# Altium schematic symbol library Resistor.SchLib: 1085 symbols (part 6 of 29)
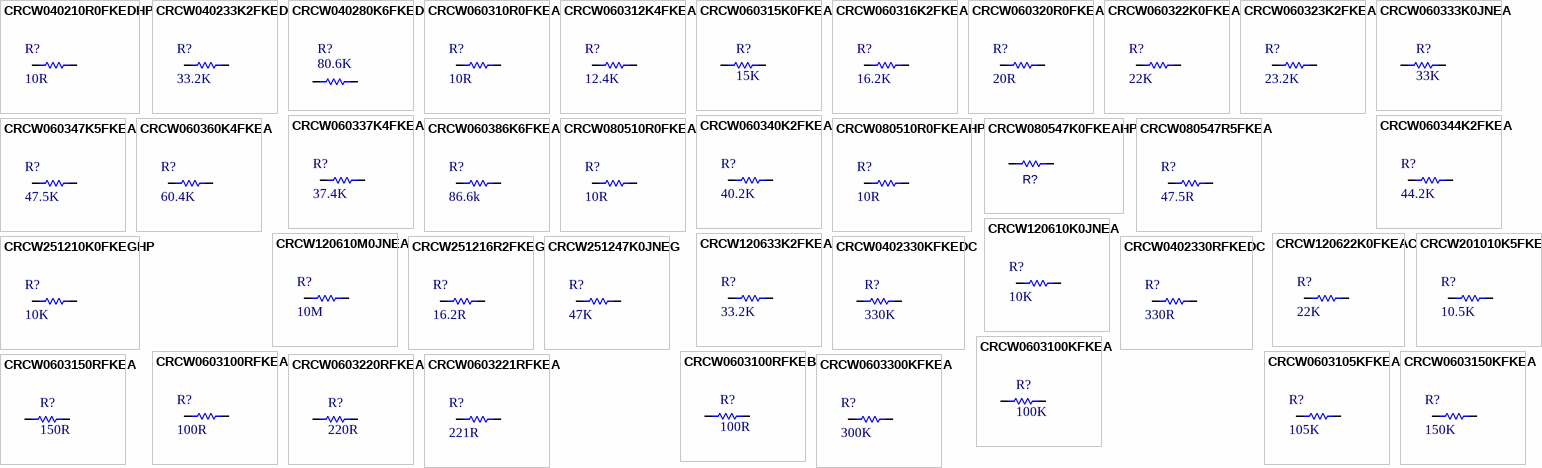
[diagram p32: symbols CRCW040210R0FKEDHP to CRCW0603300KFKEA]

## CRCW060322K0FKEA
designator R?, comment 22K
RES SMD 22K OHM 1% 1/10W 0603; Manufacturer: Vishay; Manufacturer Part Number: CRCW060322K0FKEA; Voltage Rating: 75V; Value: 22kR; Power Rating: 100mW; Temperature Coefficient: 100ppm/°C; Item Type: Resistor; Supplier: Mouser; Supplier Part Number: 71-CRCW0603-22K-E3; RoHS: Yes; Category: Chip SMD Resistors; Stock: 93410; Pricing: 1=0.1, 10=0.019, 50=0.019, 100=0.009, 1000=0.007, 10000=0.004 (USD); Case/Package: 0603; Weight: 7.1E-05oz; Case Code (Imperial): 0603; Case Code (Metric): 1608; Contact Plating: Tin; Min Operating Temperature: -55°C; Max Operating Temperature: 155°C; Resistor Type: Thick Film; Tolerance: 1%; Packaging: Tape and Reel; Package Quantity: 5000; Number of Terminations: 2; Termination: SMD/SMT; Max Power Dissipation: 100mW; Voltage Rating (DC): 75V; Features: Automotive AEC-Q200; Series: CRCW; Technology: THICK FILM; Construction: Rectangular; Resistance Tolerance: 1%; Length: 1.55mm; Width: 0.85mm; Height: 0.45mm; Depth: 0.85mm; Ratings: AEC-Q200; Radiation Hardening: No; Military Standard: Not; Lead Free: Lead Free; RoHS Compliant: Yes; Reach SVHC Compliant: Unknown; ComponentLink1URL: https://datasheet.ciiva.com/7673/1720486-7673144.pdf?src-supplier=Element14; ComponentLink1Description: https://datasheet.ciiva.com/7673/1720486-7673144.pdf?src-supplier=Element14; ComponentLink2URL: https://datasheet.ciiva.com/26314/fld-crcw-e3-data-en-26314666.pdf?src-supplier=Distrelec; ComponentLink2Description: https://datasheet.ciiva.com/26314/fld-crcw-e3-data-en-26314666.pdf?src-supplier=Distrelec; ComponentLink3URL: https://datasheet.ciiva.com/7672/1697337-7672871.pdf?src-supplier=Element14; ComponentLink3Description: https://datasheet.ciiva.com/7672/1697337-7672871.pdf?src-supplier=Element14; LCSC Part Number: C844758
footprint Res-0603
pins: 1, 2

## CRCW060323K2FKEA
designator R?, comment 23.2K
RES SMD 23.2K OHM 1% 1/10W 0603; Manufacturer: Vishay; Manufacturer Part Number: CRCW060323K2FKEA; Item Type: Resistors; Value: 23.2kR; Power Rating: 100mW; Temperature Coefficient: 100ppm/°C; Voltage Rating: 75V; Supplier: Mouser; LCSC Part Number: C844148; RoHS: Yes; Stock: 8418; Pricing: 1=0.1, 10=0.017, 50=0.017, 100=0.01, 1000=0.009, 10000=0.006 (USD); Case/Package: 0603; Pins: 2; Weight: 7.1E-05oz; Case Code (Metric): 1608; Case Code (Imperial): 0603; Contact Plating: Tin; Min Operating Temperature: -55°C; Max Operating Temperature: 155°C; Tolerance: 1%; Packaging: Tape and Reel; Package Quantity: 5000; Number of Terminations: 2; Termination: SMD/SMT; Max Power Dissipation: 100mW; Features: Automotive AEC-Q200; Series: CRCW; Resistor Type: Thick Film; Resistance Tolerance: 1%; Technology: THICK FILM; Construction: Rectangular; Length: 1.55mm; Width: 0.85mm; Height: 0.45mm; Depth: 0.85mm; Ratings: AEC-Q200; Radiation Hardening: No; Lead Free: 5697LeadFree; RoHS Compliant: Yes; Military Standard: Not; Reach SVHC Compliant: Unknown; ComponentLink1URL: https://datasheet.ciiva.com/11810/0900766b80d98afc-11810102.pdf?src-supplier=Rs; ComponentLink1Description: https://datasheet.ciiva.com/11810/0900766b80d98afc-11810102.pdf?src-supplier=Rs; ComponentLink2URL: https://datasheet.ciiva.com/7671/1533075-7671775.pdf?src-supplier=Element14; ComponentLink2Description: https://datasheet.ciiva.com/7671/1533075-7671775.pdf?src-supplier=Element14; ComponentLink3URL: https://datasheet.ciiva.com/7671/1697337-7671609.pdf?src-supplier=Element14; ComponentLink3Description: https://datasheet.ciiva.com/7671/1697337-7671609.pdf?src-supplier=Element14; ComponentLink4URL: https://datasheet.ciiva.com/2525/dcrcwe3-2525378.pdf?src-supplier=Digikey; ComponentLink4Description: https://datasheet.ciiva.com/2525/dcrcwe3-2525378.pdf?src-supplier=Digikey; ComponentLink5URL: https://datasheet.ciiva.com/2525/dcrcwe3-2525379.pdf?src-supplier=Digikey; ComponentLink5Description: https://datasheet.ciiva.com/2525/dcrcwe3-2525379.pdf?src-supplier=Digikey; ComponentLink6URL: https://datasheet.ciiva.com/22869/70201119-22869353.pdf?src-supplier=Allied+Electronics; ComponentLink6Description: https://datasheet.ciiva.com/22869/70201119-22869353.pdf?src-supplier=Allied+Electronics; ComponentLink7URL: https://datasheet.ciiva.com/5542/dcrcwe3-109170-5542813.pdf?src-supplier=Mouser; ComponentLink7Description: https://datasheet.ciiva.com/5542/dcrcwe3-109170-5542813.pdf?src-supplier=Mouser; ComponentLink8URL: https://datasheet.ciiva.com/2525/dcrcwe3-2525377.pdf?src-supplier=Digikey; ComponentLink8Description: https://datasheet.ciiva.com/2525/dcrcwe3-2525377.pdf?src-supplier=Digikey; ComponentLink9URL: https://datasheet.ciiva.com/16775/70201119-16775386.pdf?src-supplier=Allied+Electronics; ComponentLink9Description: https://datasheet.ciiva.com/16775/70201119-16775386.pdf?src-supplier=Allied+Electronics; ComponentLink10URL: https://datasheet.ciiva.com/3257/dcrcwe3-3257292.pdf?src-supplier=Avnet; ComponentLink10Description: https://datasheet.ciiva.com/3257/dcrcwe3-3257292.pdf?src-supplier=Avnet; ComponentLink11URL: https://datasheet.ciiva.com/16430/dcrcwe3-16430088.pdf?src-supplier=Future+Electronics; ComponentLink11Description: https://datasheet.ciiva.com/16430/dcrcwe3-16430088.pdf?src-supplier=Future+Electronics; ComponentLink12URL: https://datasheet.ciiva.com/3257/dcrcwe3-3257291.pdf?src-supplier=Avnet; ComponentLink12Description: https://datasheet.ciiva.com/3257/dcrcwe3-3257291.pdf?src-supplier=Avnet
footprint Res-0603
pins: 1, 2

## CRCW060333K0JNEA
designator R?, comment 33K
RES SMD 33K OHM 5% 1/10W 0603; Item Type: Resistor; Value: 33kR; Power Rating: 100mW; Voltage Rating: 75V; Temperature Coefficient: 200ppm/°C; LCSC Part Number: C4342762; ComponentLink1Description: LCSC; Supplier: Mouser; Supplier Part Number: 71-CRCW0603J-33K-E3; RoHS: Yes; Category: Chip SMD Resistors; Stock: 42690; Pricing: 1=0.1, 10=0.017, 50=0.017, 100=0.008, 1000=0.006, 10000=0.003 (USD); Case/Package: 0603; Pins: 2; Case Code (Metric): 1608; Case Code (Imperial): 0603; Weight: 7.1E-05oz; Contact Plating: Tin; Min Operating Temperature: -55°C; Max Operating Temperature: 155°C; Tolerance: 5%; Packaging: Tape and Reel; Package Quantity: 5000; Resistor Type: Thick Film; Number of Terminations: 2; Termination: SMD/SMT; Max Power Dissipation: 100mW; Voltage Rating (DC): 75V; Features: Automotive AEC-Q200; Series: CRCW; Resistance Tolerance: 5%; Construction: Rectangular; Technology: THICK FILM; Length: 1.55mm; Width: 0.85mm; Height: 0.45mm; Depth: 0.85mm; Ratings: AEC-Q200; Radiation Hardening: No; Lead Free: Lead Free; RoHS Compliant: Yes; Reach SVHC Compliant: Unknown; Military Standard: Not; ComponentLink2URL: https://datasheet.ciiva.com/2462/dcrcwe3-2462530.pdf?src-supplier=Digi-Key; ComponentLink2Description: https://datasheet.ciiva.com/2462/dcrcwe3-2462530.pdf?src-supplier=Digi-Key; ComponentLink3URL: https://datasheet.ciiva.com/2462/dcrcwe3-2462531.pdf?src-supplier=Digi-Key; ComponentLink3Description: https://datasheet.ciiva.com/2462/dcrcwe3-2462531.pdf?src-supplier=Digi-Key; ComponentLink4URL: https://datasheet.ciiva.com/2462/dcrcwe3-2462529.pdf?src-supplier=Digi-Key; ComponentLink4Description: https://datasheet.ciiva.com/2462/dcrcwe3-2462529.pdf?src-supplier=Digi-Key; ComponentLink5URL: https://datasheet.ciiva.com/16778/70201119-16778952.pdf?src-supplier=Allied+Electronics; ComponentLink5Description: https://datasheet.ciiva.com/16778/70201119-16778952.pdf?src-supplier=Allied+Electronics; ComponentLink6URL: https://datasheet.ciiva.com/5551/dcrcwe3-109170-5551035.pdf?src-supplier=Mouser; ComponentLink6Description: https://datasheet.ciiva.com/5551/dcrcwe3-109170-5551035.pdf?src-supplier=Mouser; ComponentLink7URL: https://datasheet.ciiva.com/3257/dcrcwe3-3257470.pdf?src-supplier=Avnet; ComponentLink7Description: https://datasheet.ciiva.com/3257/dcrcwe3-3257470.pdf?src-supplier=Avnet; ComponentLink8URL: https://datasheet.ciiva.com/16389/dcrcwe3-16389979.pdf?src-supplier=Future+Electronics; ComponentLink8Description: https://datasheet.ciiva.com/16389/dcrcwe3-16389979.pdf?src-supplier=Future+Electronics; ComponentLink9URL: https://datasheet.ciiva.com/3257/dcrcwe3-3257469.pdf?src-supplier=Avnet; ComponentLink9Description: https://datasheet.ciiva.com/3257/dcrcwe3-3257469.pdf?src-supplier=Avnet
footprint Res-0603
pins: 1, 2

## CRCW060337K4FKEA
designator R?, comment 37.4K
RES SMD 37.4K OHM 1% 1/10W 0603; Manufacturer: Vishay; Manufacturer Part Number: CRCW060337K4FKEA; Item Type: Resistor; Supplier: Digikey; LCSC Part Number: C844359; RoHS: Yes; Stock: 9664; Pricing: 1=0.1, 10=0.026, 50=0.0166, 100=0.014, 500=0.00954, 1000=0.00824 (USD); ComponentLink1URL: https://datasheet.ciiva.com/5541/dcrcwe3-109170-5541061.pdf?src-supplier=Mouser; ComponentLink1Description: https://datasheet.ciiva.com/5541/dcrcwe3-109170-5541061.pdf?src-supplier=Mouser; ComponentLink2URL: https://datasheet.ciiva.com/22705/1697337-22705851.pdf?src-supplier=Element14; ComponentLink2Description: https://datasheet.ciiva.com/22705/1697337-22705851.pdf?src-supplier=Element14; ComponentLink3URL: https://datasheet.ciiva.com/16770/70201119-16770680.pdf?src-supplier=Allied+Electronics; ComponentLink3Description: https://datasheet.ciiva.com/16770/70201119-16770680.pdf?src-supplier=Allied+Electronics; ComponentLink4URL: https://datasheet.ciiva.com/7671/1697337-7671645.pdf?src-supplier=Element14; ComponentLink4Description: https://datasheet.ciiva.com/7671/1697337-7671645.pdf?src-supplier=Element14; ComponentLink5URL: https://datasheet.ciiva.com/7671/1697337-7671646.pdf?src-supplier=Element14; ComponentLink5Description: https://datasheet.ciiva.com/7671/1697337-7671646.pdf?src-supplier=Element14; ComponentLink6URL: https://datasheet.ciiva.com/3257/dcrcwe3-3257503.pdf?src-supplier=Avnet; ComponentLink6Description: https://datasheet.ciiva.com/3257/dcrcwe3-3257503.pdf?src-supplier=Avnet; ComponentLink7URL: https://datasheet.ciiva.com/7792/125364-7792237.pdf?src-supplier=Element14; ComponentLink7Description: https://datasheet.ciiva.com/7792/125364-7792237.pdf?src-supplier=Element14; ComponentLink8URL: https://datasheet.ciiva.com/16203/dcrcwe3-16203015.pdf?src-supplier=Future+Electronics; ComponentLink8Description: https://datasheet.ciiva.com/16203/dcrcwe3-16203015.pdf?src-supplier=Future+Electronics; ComponentLink9URL: https://datasheet.ciiva.com/2465/dcrcwe3-2465762.pdf?src-supplier=Digikey; ComponentLink9Description: https://datasheet.ciiva.com/2465/dcrcwe3-2465762.pdf?src-supplier=Digikey; ComponentLink10URL: https://datasheet.ciiva.com/2465/dcrcwe3-2465763.pdf?src-supplier=Digikey; ComponentLink10Description: https://datasheet.ciiva.com/2465/dcrcwe3-2465763.pdf?src-supplier=Digikey; ComponentLink11URL: https://datasheet.ciiva.com/2465/dcrcwe3-2465764.pdf?src-supplier=Digikey; ComponentLink11Description: https://datasheet.ciiva.com/2465/dcrcwe3-2465764.pdf?src-supplier=Digikey; ComponentLink12URL: https://datasheet.ciiva.com/8337/dcrcwe3-8337085.pdf?src-supplier=Avnet; ComponentLink12Description: https://datasheet.ciiva.com/8337/dcrcwe3-8337085.pdf?src-supplier=Avnet
footprint Res-0603
pins: 1, 2

## CRCW060340K2FKEA
designator R?, comment 40.2K
RES SMD 40.2K OHM 1% 1/10W 0603; Manufacturer: Vishay; Manufacturer Part Number: CRCW060340K2FKEA; Item Type: Resistors; Voltage Rating (DC): 75V; Supplier: Mouser; LCSC Part Number: C844784; RoHS: Yes; Stock: 59547; Pricing: 1=0.1, 10=0.017, 50=0.017, 100=0.012, 1000=0.008, 10000=0.006 (USD); Lead Free: 5697LeadFree; RoHS Compliant: 5897YesNo; ComponentLink1URL: https://datasheet.ciiva.com/11808/0900766b80d98afc-11808241.pdf?src-supplier=Rs; ComponentLink1Description: https://datasheet.ciiva.com/11808/0900766b80d98afc-11808241.pdf?src-supplier=Rs; ComponentLink2URL: https://datasheet.ciiva.com/3257/dcrcwe3-3257564.pdf?src-supplier=Avnet; ComponentLink2Description: https://datasheet.ciiva.com/3257/dcrcwe3-3257564.pdf?src-supplier=Avnet; ComponentLink3URL: https://datasheet.ciiva.com/3257/dcrcwe3-3257565.pdf?src-supplier=Avnet; ComponentLink3Description: https://datasheet.ciiva.com/3257/dcrcwe3-3257565.pdf?src-supplier=Avnet; ComponentLink4URL: https://datasheet.ciiva.com/16213/dcrcwe3-16213771.pdf?src-supplier=Future+Electronics; ComponentLink4Description: https://datasheet.ciiva.com/16213/dcrcwe3-16213771.pdf?src-supplier=Future+Electronics; ComponentLink5URL: https://datasheet.ciiva.com/5550/dcrcwe3-109170-5550410.pdf?src-supplier=Mouser; ComponentLink5Description: https://datasheet.ciiva.com/5550/dcrcwe3-109170-5550410.pdf?src-supplier=Mouser; ComponentLink6URL: https://datasheet.ciiva.com/16786/70201119-16786731.pdf?src-supplier=Allied+Electronics; ComponentLink6Description: https://datasheet.ciiva.com/16786/70201119-16786731.pdf?src-supplier=Allied+Electronics; ComponentLink7URL: https://datasheet.ciiva.com/7671/1533075-7671781.pdf?src-supplier=Element14; ComponentLink7Description: https://datasheet.ciiva.com/7671/1533075-7671781.pdf?src-supplier=Element14
footprint Res-0603
pins: 1, 2

## CRCW060344K2FKEA
designator R?, comment 44.2K
RES SMD 44.2K OHM 1% 1/10W 0603; Manufacturer: Vishay; Manufacturer Part Number: CRCW060344K2FKEA; Item Type: Resistor; Voltage Rating (DC): 75V; Supplier: Digikey; LCSC Part Number: C844365; RoHS: Yes; Stock: 24979; Pricing: 1=0.1, 10=0.026, 50=0.0166, 100=0.014, 500=0.00954, 1000=0.00824 (USD); Lead Free: 5697LeadFree; ComponentLink1URL: https://datasheet.ciiva.com/11812/0900766b80d98afc-11812612.pdf?src-supplier=Rs; ComponentLink1Description: https://datasheet.ciiva.com/11812/0900766b80d98afc-11812612.pdf?src-supplier=Rs; ComponentLink2URL: https://datasheet.ciiva.com/2466/dcrcwe3-2466281.pdf?src-supplier=Digikey; ComponentLink2Description: https://datasheet.ciiva.com/2466/dcrcwe3-2466281.pdf?src-supplier=Digikey; ComponentLink3URL: https://datasheet.ciiva.com/2466/dcrcwe3-2466282.pdf?src-supplier=Digikey; ComponentLink3Description: https://datasheet.ciiva.com/2466/dcrcwe3-2466282.pdf?src-supplier=Digikey; ComponentLink4URL: https://datasheet.ciiva.com/2466/dcrcwe3-2466283.pdf?src-supplier=Digikey; ComponentLink4Description: https://datasheet.ciiva.com/2466/dcrcwe3-2466283.pdf?src-supplier=Digikey; ComponentLink5URL: https://datasheet.ciiva.com/15159/getdatasheetpartid-52050-15159597.pdf?src-supplier=Verical; ComponentLink5Description: https://datasheet.ciiva.com/15159/getdatasheetpartid-52050-15159597.pdf?src-supplier=Verical; ComponentLink6URL: https://datasheet.ciiva.com/16507/dcrcwe3-16507773.pdf?src-supplier=Future+Electronics; ComponentLink6Description: https://datasheet.ciiva.com/16507/dcrcwe3-16507773.pdf?src-supplier=Future+Electronics; ComponentLink7URL: https://datasheet.ciiva.com/22705/1697337-22705852.pdf?src-supplier=Element14; ComponentLink7Description: https://datasheet.ciiva.com/22705/1697337-22705852.pdf?src-supplier=Element14; ComponentLink8URL: https://datasheet.ciiva.com/7671/1697337-7671657.pdf?src-supplier=Element14; ComponentLink8Description: https://datasheet.ciiva.com/7671/1697337-7671657.pdf?src-supplier=Element14; ComponentLink9URL: https://datasheet.ciiva.com/7671/1697337-7671658.pdf?src-supplier=Element14; ComponentLink9Description: https://datasheet.ciiva.com/7671/1697337-7671658.pdf?src-supplier=Element14; ComponentLink10URL: https://datasheet.ciiva.com/16772/70201119-16772373.pdf?src-supplier=Allied+Electronics; ComponentLink10Description: https://datasheet.ciiva.com/16772/70201119-16772373.pdf?src-supplier=Allied+Electronics; ComponentLink11URL: https://datasheet.ciiva.com/22872/70201119-22872024.pdf?src-supplier=Allied+Electronics; ComponentLink11Description: https://datasheet.ciiva.com/22872/70201119-22872024.pdf?src-supplier=Allied+Electronics
footprint Res-0603
pins: 1, 2

## CRCW060347K5FKEA
designator R?, comment 47.5K
RES SMD 47.5K OHM 1% 1/10W 0603; Manufacturer: Vishay; Manufacturer Part Number: CRCW060347K5FKEA; Item Type: Resistors; Value: 47.5kR; Temperature Coefficient: 100ppm/°C; Max Power Dissipation: 100mW; Voltage Rating: 75V; Supplier: Mouser; LCSC Part Number: C844568; RoHS: Yes; Stock: 130545; Pricing: 1=0.1, 10=0.016, 50=0.016, 100=0.01, 1000=0.009, 10000=0.004 (USD); Case/Package: 0603; Weight: 7.1E-05oz; Case Code (Imperial): 0603; Case Code (Metric): 1608; Contact Plating: Tin; Min Operating Temperature: -55°C; Max Operating Temperature: 155°C; Tolerance: 1%; Packaging: Tape and Reel; Package Quantity: 10; Number of Terminations: 2; Features: Automotive AEC-Q200; Series: CRCW; Power Rating: 100mW; Resistor Type: Thick Film; Termination: SMD/SMT; Resistance Tolerance: 1%; Construction: Rectangular; Technology: THICK FILM; Voltage Rating (DC): 75V; Length: 1.55mm; Width: 0.033inch; Height: 0.45mm; Depth: 0.85mm; Radiation Hardening: No; RoHS Compliant: Yes; Military Standard: Not; Reach SVHC Compliant: Unknown; ComponentLink1URL: https://datasheet.ciiva.com/11810/0900766b80d98afc-11810543.pdf?src-supplier=Rs; ComponentLink1Description: https://datasheet.ciiva.com/11810/0900766b80d98afc-11810543.pdf?src-supplier=Rs; ComponentLink2URL: https://datasheet.ciiva.com/7841/1697337-7841832.pdf?src-supplier=Element14; ComponentLink2Description: https://datasheet.ciiva.com/7841/1697337-7841832.pdf?src-supplier=Element14; ComponentLink3URL: https://datasheet.ciiva.com/7841/125364-7841833.pdf?src-supplier=Element14; ComponentLink3Description: https://datasheet.ciiva.com/7841/125364-7841833.pdf?src-supplier=Element14; ComponentLink4URL: https://datasheet.ciiva.com/2465/dcrcwe3-2465817.pdf?src-supplier=Digikey; ComponentLink4Description: https://datasheet.ciiva.com/2465/dcrcwe3-2465817.pdf?src-supplier=Digikey; ComponentLink5URL: https://datasheet.ciiva.com/2465/dcrcwe3-2465818.pdf?src-supplier=Digikey; ComponentLink5Description: https://datasheet.ciiva.com/2465/dcrcwe3-2465818.pdf?src-supplier=Digikey; ComponentLink6URL: https://datasheet.ciiva.com/2465/dcrcwe3-2465816.pdf?src-supplier=Digikey; ComponentLink6Description: https://datasheet.ciiva.com/2465/dcrcwe3-2465816.pdf?src-supplier=Digikey; ComponentLink7URL: https://datasheet.ciiva.com/16769/70201119-16769373.pdf?src-supplier=Allied+Electronics; ComponentLink7Description: https://datasheet.ciiva.com/16769/70201119-16769373.pdf?src-supplier=Allied+Electronics
footprint Res-0603
pins: 1, 2

## CRCW060360K4FKEA
designator R?, comment 60.4K
RES SMD 60.4K OHM 1% 1/10W 0603; Manufacturer: Vishay; Manufacturer Part Number: CRCW060360K4FKEA; Item Type: Resistors; Voltage Rating (DC): 75V; Supplier: Digikey; LCSC Part Number: C844800; RoHS: Yes; Stock: 57146; Pricing: 1=0.1, 10=0.026, 50=0.0166, 100=0.014, 500=0.00954, 1000=0.00824 (USD); Lead Free: 5697LeadFree; ComponentLink1URL: https://datasheet.ciiva.com/11809/0900766b80d98afc-11809685.pdf?src-supplier=Rs; ComponentLink1Description: https://datasheet.ciiva.com/11809/0900766b80d98afc-11809685.pdf?src-supplier=Rs; ComponentLink2URL: https://datasheet.ciiva.com/2494/dcrcwe3-2494471.pdf?src-supplier=Digikey; ComponentLink2Description: https://datasheet.ciiva.com/2494/dcrcwe3-2494471.pdf?src-supplier=Digikey; ComponentLink3URL: https://datasheet.ciiva.com/2494/dcrcwe3-2494472.pdf?src-supplier=Digikey; ComponentLink3Description: https://datasheet.ciiva.com/2494/dcrcwe3-2494472.pdf?src-supplier=Digikey; ComponentLink4URL: https://datasheet.ciiva.com/2494/dcrcwe3-2494473.pdf?src-supplier=Digikey; ComponentLink4Description: https://datasheet.ciiva.com/2494/dcrcwe3-2494473.pdf?src-supplier=Digikey; ComponentLink5URL: https://datasheet.ciiva.com/3257/dcrcwe3-3257786.pdf?src-supplier=Avnet; ComponentLink5Description: https://datasheet.ciiva.com/3257/dcrcwe3-3257786.pdf?src-supplier=Avnet; ComponentLink6URL: https://datasheet.ciiva.com/3257/dcrcwe3-3257787.pdf?src-supplier=Avnet; ComponentLink6Description: https://datasheet.ciiva.com/3257/dcrcwe3-3257787.pdf?src-supplier=Avnet; ComponentLink7URL: https://datasheet.ciiva.com/16391/dcrcwe3-16391304.pdf?src-supplier=Future+Electronics; ComponentLink7Description: https://datasheet.ciiva.com/16391/dcrcwe3-16391304.pdf?src-supplier=Future+Electronics; ComponentLink8URL: https://datasheet.ciiva.com/22676/1847332-22676330.pdf?src-supplier=Element14; ComponentLink8Description: https://datasheet.ciiva.com/22676/1847332-22676330.pdf?src-supplier=Element14; ComponentLink9URL: https://datasheet.ciiva.com/16760/70201119-16760503.pdf?src-supplier=Allied+Electronics; ComponentLink9Description: https://datasheet.ciiva.com/16760/70201119-16760503.pdf?src-supplier=Allied+Electronics; ComponentLink10URL: https://datasheet.ciiva.com/5545/dcrcwe3-109170-5545721.pdf?src-supplier=Mouser; ComponentLink10Description: https://datasheet.ciiva.com/5545/dcrcwe3-109170-5545721.pdf?src-supplier=Mouser; ComponentLink11URL: https://datasheet.ciiva.com/7816/1697337-7816053.pdf?src-supplier=Element14; ComponentLink11Description: https://datasheet.ciiva.com/7816/1697337-7816053.pdf?src-supplier=Element14
footprint Res-0603
pins: 1, 2

## CRCW060386K6FKEA
designator R?, comment 86.6k
RES SMD 86.6K OHM 1% 1/10W 0603; Manufacturer: Vishay; Manufacturer Part Number: CRCW060386K6FKEA; Item Type: Resistors; Value: 86.6kR; Power Rating: 100mW; Voltage Rating: 75V; Temperature Coefficient: 100ppm/°C; Supplier: Mouser; LCSC Part Number: C2076678; RoHS: Yes; Stock: 21228; Pricing: 1=0.1, 10=0.017, 50=0.017, 100=0.01, 1000=0.008, 10000=0.004 (USD); Case/Package: 0603; Pins: 2; Weight: 7.1E-05oz; Case Code (Metric): 1608; Case Code (Imperial): 0603; Contact Plating: Tin; Min Operating Temperature: -55°C; Max Operating Temperature: 155°C; Tolerance: 1%; Packaging: Tape and Reel; Package Quantity: 5000; Number of Terminations: 2; Termination: SMD/SMT; Max Power Dissipation: 100mW; Features: Automotive AEC-Q200; Series: CRCW; Resistor Type: Thick Film; Construction: Rectangular; Technology: THICK FILM; Resistance Tolerance: 1%; Voltage Rating (DC): 75V; Length: 1.55mm; Width: 0.85mm; Height: 0.45mm; Depth: 0.85mm; Ratings: AEC-Q200; Radiation Hardening: No; RoHS Compliant: Yes; Lead Free: 5697LeadFree; Military Standard: Not; Reach SVHC Compliant: Unknown; ComponentLink1URL: https://datasheet.ciiva.com/11812/0900766b80d98afc-11812181.pdf?src-supplier=Rs; ComponentLink1Description: https://datasheet.ciiva.com/11812/0900766b80d98afc-11812181.pdf?src-supplier=Rs; ComponentLink2URL: https://datasheet.ciiva.com/2466/dcrcwe3-2466293.pdf?src-supplier=Digikey; ComponentLink2Description: https://datasheet.ciiva.com/2466/dcrcwe3-2466293.pdf?src-supplier=Digikey; ComponentLink3URL: https://datasheet.ciiva.com/16779/70201119-16779662.pdf?src-supplier=Allied+Electronics; ComponentLink3Description: https://datasheet.ciiva.com/16779/70201119-16779662.pdf?src-supplier=Allied+Electronics; ComponentLink4URL: https://datasheet.ciiva.com/22869/70201119-22869020.pdf?src-supplier=Allied+Electronics; ComponentLink4Description: https://datasheet.ciiva.com/22869/70201119-22869020.pdf?src-supplier=Allied+Electronics; ComponentLink5URL: https://datasheet.ciiva.com/5549/dcrcwe3-109170-5549565.pdf?src-supplier=Mouser; ComponentLink5Description: https://datasheet.ciiva.com/5549/dcrcwe3-109170-5549565.pdf?src-supplier=Mouser; ComponentLink6URL: https://datasheet.ciiva.com/2466/dcrcwe3-2466294.pdf?src-supplier=Digikey; ComponentLink6Description: https://datasheet.ciiva.com/2466/dcrcwe3-2466294.pdf?src-supplier=Digikey; ComponentLink7URL: https://datasheet.ciiva.com/2466/dcrcwe3-2466295.pdf?src-supplier=Digikey; ComponentLink7Description: https://datasheet.ciiva.com/2466/dcrcwe3-2466295.pdf?src-supplier=Digikey; ComponentLink8URL: https://datasheet.ciiva.com/3257/dcrcwe3-3257941.pdf?src-supplier=Avnet; ComponentLink8Description: https://datasheet.ciiva.com/3257/dcrcwe3-3257941.pdf?src-supplier=Avnet; ComponentLink9URL: https://datasheet.ciiva.com/8337/dcrcwe3-8337688.pdf?src-supplier=Avnet; ComponentLink9Description: https://datasheet.ciiva.com/8337/dcrcwe3-8337688.pdf?src-supplier=Avnet; ComponentLink10URL: https://datasheet.ciiva.com/16435/dcrcw-16435963.pdf?src-supplier=Future+Electronics; ComponentLink10Description: https://datasheet.ciiva.com/16435/dcrcw-16435963.pdf?src-supplier=Future+Electronics
footprint Res-0603
pins: 1, 2

## CRCW080510R0FKEA
designator R?, comment 10R
RES SMD 10 OHM 1% 1/8W 0805; Manufacturer: Vishay; Manufacturer Part Number: CRCW080510R0FKEA; Item Type: Resistors; Voltage Rating (DC): 150V; Power Rating: 125mW; Temperature Coefficient: 100ppm/°C; Supplier: Mouser; LCSC Part Number: C844938; RoHS: Yes; Stock: 217693; Pricing: 1=0.1, 10=0.025, 50=0.025, 100=0.015, 1000=0.012, 10000=0.007 (USD); Case/Package: 0805; Pins: 2; Weight: 0.000194oz; Case Code (Metric): 2012; Case Code (Imperial): 0805; Contact Plating: Tin; Min Operating Temperature: -55°C; Max Operating Temperature: 155°C; Value: 10R; Packaging: Tape and Reel; Tolerance: 1%; Voltage Rating: 150V; Package Quantity: 10; Resistor Type: Thick Film; Number of Terminations: 2; Termination: SMD/SMT; Max Power Dissipation: 125mW; Features: Automotive AEC-Q200; Series: CRCW; Resistance Tolerance: 1%; Construction: Rectangular; Technology: THICK FILM; Length: 2mm; Width: 0.049inch; Height: 0.45mm; Depth: 1.25mm; Ratings: AEC-Q200; Lead Free: Lead Free; Military Standard: Not; RoHS Compliant: Yes; Reach SVHC Compliant: Unknown; ComponentLink1URL: https://datasheet.ciiva.com/7107/smdpack-7107200.pdf?src-supplier=Newark; ComponentLink1Description: https://datasheet.ciiva.com/7107/smdpack-7107200.pdf?src-supplier=Newark; ComponentLink2URL: https://datasheet.ciiva.com/2467/dcrcwe3-2467174.pdf?src-supplier=Digikey; ComponentLink2Description: https://datasheet.ciiva.com/2467/dcrcwe3-2467174.pdf?src-supplier=Digikey; ComponentLink3URL: https://datasheet.ciiva.com/2467/dcrcwe3-2467173.pdf?src-supplier=Digikey; ComponentLink3Description: https://datasheet.ciiva.com/2467/dcrcwe3-2467173.pdf?src-supplier=Digikey; ComponentLink4URL: https://datasheet.ciiva.com/16289/dcrcwe3-16289579.pdf?src-supplier=Future+Electronics; ComponentLink4Description: https://datasheet.ciiva.com/16289/dcrcwe3-16289579.pdf?src-supplier=Future+Electronics
footprint RES-0805 (SMD 0805)
pins: 1, 2

## CRCW080510R0FKEAHP
designator R?, comment 10R
RES SMD 10 OHM 1% 1/2W 0805; Manufacturer: Vishay; Manufacturer Part Number: CRCW080510R0FKEAHP; Item Type: Resistor; Power Rating: 330mW; Voltage Rating: 150V; Temperature Coefficient: 100ppm/°C; Max Power Dissipation: 333mW; Supplier: Mouser; LCSC Part Number: C844598; RoHS: Yes; Stock: 384044; Pricing: 1=0.19, 10=0.066, 50=0.066, 100=0.04, 1000=0.027, 10000=0.023 (USD); Case/Package: 0805; Weight: 0.000194oz; Case Code (Imperial): 0805; Case Code (Metric): 2012; Contact Plating: Tin; Min Operating Temperature: -55°C; Max Operating Temperature: 155°C; Value: 10R; Tolerance: 1%; Packaging: Tape and Reel; Package Quantity: 5000; Resistor Type: Thick Film; Termination: SMD/SMT; Voltage Rating (DC): 150V; Features: Automotive AEC-Q200; Series: CRCW-HP; Number of Terminations: 2; Resistance Tolerance: 1%; Technology: THICK FILM; Construction: Rectangular; Length: 2mm; Width: 1.2mm; Height: 0.5mm; Depth: 1.25mm; Ratings: AEC-Q200; Radiation Hardening: No; Military Standard: Not; Lead Free: Lead Free; RoHS Compliant: Yes; Reach SVHC Compliant: Unknown; ComponentLink1URL: http://www.farnell.com/datasheets/2884039.pdf?src-supplier=Newark; ComponentLink1Description: http://www.farnell.com/datasheets/2884039.pdf?src-supplier=Newark; ComponentLink2URL: https://datasheet.octopart.com/CRCW080510R0FKEAHP-Vishay-datasheet-87136057.pdf?src-supplier=Newark; ComponentLink2Description: https://datasheet.octopart.com/CRCW080510R0FKEAHP-Vishay-datasheet-87136057.pdf?src-supplier=Newark; ComponentLink3URL: http://www.vishay.com/docs/20043/crcwhpe3.pdf?src-supplier=Digikey; ComponentLink3Description: http://www.vishay.com/docs/20043/crcwhpe3.pdf?src-supplier=Digikey
footprint RES-0805 (SMD 0805)
pins: 1, 2

## CRCW080547K0FKEAHP
designator R?, comment 47K  (value not drawn)
RES SMD 47K OHM 1% 1/3W 0805; Manufacturer: Vishay; Manufacturer Part Number: CRCW080547K0FKEAHP; Power Rating: 330mW; Resistance: 47kR; Temperature Coefficient: 100ppm/°C; Voltage Rating: 150V; Max Power Dissipation: 333mW; ComponentLink1URL: https://www.verical.com/server-webapp/html/getDatasheet?partID=409513; ComponentLink1Description: https://www.verical.com/server-webapp/html/getDatasheet?partID=409513; ComponentLink2URL: http://components.arrow.com/part/dataview/44988207S7163511N1174; ComponentLink2Description: http://components.arrow.com/part/dataview/44988207S7163511N1174; ComponentLink3URL: https://www.seielect.com/Catalog/SEI-RMCF_RMCP.pdf; ComponentLink3Description: https://www.seielect.com/Catalog/SEI-RMCF_RMCP.pdf; ComponentLink4URL: http://www.seielect.com/catalog/sei-rmc.pdf; ComponentLink4Description: http://www.seielect.com/catalog/sei-rmc.pdf; ComponentLink5URL: https://datasheet.ciiva.com/7777/424479-7777391.pdf; ComponentLink5Description: https://datasheet.ciiva.com/7777/424479-7777391.pdf; ComponentLink6URL: https://datasheet.ciiva.com/2581/crcwhpe3-2581488.pdf; ComponentLink6Description: https://datasheet.ciiva.com/2581/crcwhpe3-2581488.pdf; ComponentLink7URL: https://datasheet.ciiva.com/11808/0900766b80d98b26-11808546.pdf; ComponentLink7Description: https://datasheet.ciiva.com/11808/0900766b80d98b26-11808546.pdf; ComponentLink8URL: https://datasheet.ciiva.com/8934/dcrcwe3-8934585.pdf; ComponentLink8Description: https://datasheet.ciiva.com/8934/dcrcwe3-8934585.pdf; ComponentLink9URL: https://datasheet.ciiva.com/2467/dcrcwe3-2467241.pdf; ComponentLink9Description: https://datasheet.ciiva.com/2467/dcrcwe3-2467241.pdf; ComponentLink10URL: https://datasheet.ciiva.com/7777/1697337-7777401.pdf; ComponentLink10Description: https://datasheet.ciiva.com/7777/1697337-7777401.pdf; ComponentLink11URL: https://datasheet.ciiva.com/16852/dcrcwe3-16852347.pdf; ComponentLink11Description: https://datasheet.ciiva.com/16852/dcrcwe3-16852347.pdf; ComponentLink12URL: https://datasheet.ciiva.com/16200/dcrcwe3-16200123.pdf; ComponentLink12Description: https://datasheet.ciiva.com/16200/dcrcwe3-16200123.pdf; ComponentLink13URL: https://datasheet.ciiva.com/16725/70201119-16725227.pdf; ComponentLink13Description: https://datasheet.ciiva.com/16725/70201119-16725227.pdf; ComponentLink14URL: https://datasheet.ciiva.com/2467/dcrcwe3-2467239.pdf; ComponentLink14Description: https://datasheet.ciiva.com/2467/dcrcwe3-2467239.pdf; ComponentLink15URL: https://datasheet.ciiva.com/7777/1720486-7777575.pdf; ComponentLink15Description: https://datasheet.ciiva.com/7777/1720486-7777575.pdf; ComponentLink16URL: https://datasheet.ciiva.com/8934/dcrcwe3-8934581.pdf; ComponentLink16Description: https://datasheet.ciiva.com/8934/dcrcwe3-8934581.pdf; ComponentLink17URL: https://datasheet.ciiva.com/2467/dcrcwe3-2467240.pdf; ComponentLink17Description: https://datasheet.ciiva.com/2467/dcrcwe3-2467240.pdf; ComponentLink18URL: https://datasheet.ciiva.com/7777/1720486-7777576.pdf; ComponentLink18Description: https://datasheet.ciiva.com/7777/1720486-7777576.pdf; ComponentLink19URL: https://datasheet.ciiva.com/5546/dcrcwe3-109170-5546983.pdf; ComponentLink19Description: https://datasheet.ciiva.com/5546/dcrcwe3-109170-5546983.pdf; ComponentLink20URL: http://www.vishay.com/docs/20043/crcwhpe3.pdf?src-supplier=Digi-Key; ComponentLink20Description: http://www.vishay.com/docs/20043/crcwhpe3.pdf?src-supplier=Digi-Key; ComponentLink21URL: http://www.mouser.com/ds/2/427/crcwhpe3-46056.pdf?src-supplier=Mouser; ComponentLink21Description: http://www.mouser.com/ds/2/427/crcwhpe3-46056.pdf?src-supplier=Mouser; ComponentLink22URL: http://www.farnell.com/datasheets/2140397.pdf?src-supplier=Element14; ComponentLink22Description: http://www.farnell.com/datasheets/2140397.pdf?src-supplier=Element14; Supplier 1: Arrow; Stock 1: 55; Pricing 1: 1=0.2375, 10=0.2014, 25=0.1942 (USD); Mount: Surface Mount; Case/Package: 0805; Weight: 0.000194oz; Case Code (Imperial): 0805; Case Code (Metric): 2012; Contact Plating: Tin; Min Operating Temperature: -55°C; Max Operating Temperature: 155°C; Tolerance: 1%; Packaging: Cut Tape; Package Quantity: 10; Termination: SMD/SMT; Composition: Thick Film; Number of Terminations: 2; Voltage Rating (DC): 150V; Features: Automotive AEC-Q200; Length: 2mm; Height: 0.024inch; Width: 1.2mm; Depth: 1.25mm; Lead Free: Lead Free; REACH SVHC: Unknown; ComponentLink23URL: http://www.vishay.com/docs/20043/crcwhpe3.pdf?src-supplier=Avnet; ComponentLink23Description: http://www.vishay.com/docs/20043/crcwhpe3.pdf?src-supplier=Avnet; Supplier Part Number 1: CRCW080547K0FKEAHP; LCSC Part Number: C844000
footprint RES-0805 (SMD 0805)
pins: 1, 2

## CRCW080547R5FKEA
designator R?, comment 47.5R
RES SMD 47.5 OHM 1% 1/8W 0805; Manufacturer: Vishay; Manufacturer Part Number: CRCW080547R5FKEA; Item Type: Resistors; Voltage Rating (DC): 150V; Supplier: Mouser; LCSC Part Number: C2077146; RoHS: Yes; Stock: 38170; Pricing: 1=0.1, 10=0.024, 50=0.024, 100=0.015, 1000=0.012, 10000=0.006 (USD); Lead Free: 5697LeadFree; ComponentLink1URL: https://datasheet.ciiva.com/11810/0900766b80d98b26-11810926.pdf?src-supplier=Rs; ComponentLink1Description: https://datasheet.ciiva.com/11810/0900766b80d98b26-11810926.pdf?src-supplier=Rs; ComponentLink2URL: https://datasheet.ciiva.com/5546/dcrcwe3-109170-5546325.pdf?src-supplier=Mouser; ComponentLink2Description: https://datasheet.ciiva.com/5546/dcrcwe3-109170-5546325.pdf?src-supplier=Mouser; ComponentLink3URL: https://datasheet.ciiva.com/7732/1697337-7732141.pdf?src-supplier=Element14; ComponentLink3Description: https://datasheet.ciiva.com/7732/1697337-7732141.pdf?src-supplier=Element14; ComponentLink4URL: https://datasheet.ciiva.com/7732/1697337-7732215.pdf?src-supplier=Element14; ComponentLink4Description: https://datasheet.ciiva.com/7732/1697337-7732215.pdf?src-supplier=Element14; ComponentLink5URL: https://datasheet.ciiva.com/9004/dcrcwe3-9004778.pdf?src-supplier=Avnet; ComponentLink5Description: https://datasheet.ciiva.com/9004/dcrcwe3-9004778.pdf?src-supplier=Avnet; ComponentLink6URL: https://datasheet.ciiva.com/9004/dcrcwe3-9004782.pdf?src-supplier=Avnet; ComponentLink6Description: https://datasheet.ciiva.com/9004/dcrcwe3-9004782.pdf?src-supplier=Avnet; ComponentLink7URL: https://datasheet.ciiva.com/2467/dcrcwe3-2467502.pdf?src-supplier=Digikey; ComponentLink7Description: https://datasheet.ciiva.com/2467/dcrcwe3-2467502.pdf?src-supplier=Digikey; ComponentLink8URL: https://datasheet.ciiva.com/2467/dcrcwe3-2467500.pdf?src-supplier=Digikey; ComponentLink8Description: https://datasheet.ciiva.com/2467/dcrcwe3-2467500.pdf?src-supplier=Digikey; ComponentLink9URL: https://datasheet.ciiva.com/2467/dcrcwe3-2467501.pdf?src-supplier=Digikey; ComponentLink9Description: https://datasheet.ciiva.com/2467/dcrcwe3-2467501.pdf?src-supplier=Digikey; ComponentLink10URL: https://datasheet.ciiva.com/16435/dcrcwe3-16435901.pdf?src-supplier=Future+Electronics; ComponentLink10Description: https://datasheet.ciiva.com/16435/dcrcwe3-16435901.pdf?src-supplier=Future+Electronics; ComponentLink11URL: https://datasheet.ciiva.com/15159/getdatasheetpartid-45748-15159546.pdf?src-supplier=Verical; ComponentLink11Description: https://datasheet.ciiva.com/15159/getdatasheetpartid-45748-15159546.pdf?src-supplier=Verical
footprint RES-0805 (SMD 0805)
pins: 1, 2

## CRCW120610K0JNEA
designator R?, comment 10K
RES SMD 10K OHM 5% 1/4W 1206; Manufacturer: Vishay Dale; Manufacturer Part Number: CRCW120610K0JNEA; Item Type: Resistors; Voltage Rating (DC): 200V; Value: 10kR; Power Rating: 250mW; Temperature Coefficient: 200ppm/°C; Supplier: Mouser; LCSC Part Number: C844646; RoHS: Yes; Stock: 86077; Pricing: 1=0.1, 10=0.027, 50=0.027, 100=0.017, 1000=0.014, 10000=0.006 (USD); Case/Package: 1206; Pins: 2NUMBER; Weight: 0.000353oz; Case Code (Imperial): 1206; Case Code (Metric): 3216; Contact Plating: Tin; Min Operating Temperature: -55°C; Max Operating Temperature: 155°C; Tolerance: 5%; Voltage Rating: 200V; Packaging: Tape and Reel; Package Quantity: 5000; Resistor Type: Thick Film; Termination: SMD/SMT; Features: Automotive AEC-Q200; Series: CRCW; Max Power Dissipation: 250mW; Number of Terminations: 2; Resistance Tolerance: 5%; Construction: Rectangular; Length: 3.2mm; Width: 1.6mm; Height: 0.55mm; Depth: 1.6mm; Radiation Hardening: No; Lead Free: 5697LeadFree; Military Standard: Not; RoHS Compliant: Yes; Reach SVHC Compliant: Unknown; ComponentLink1URL: https://datasheet.ciiva.com/16724/70201119-16724109.pdf?src-supplier=Allied+Electronics; ComponentLink1Description: https://datasheet.ciiva.com/16724/70201119-16724109.pdf?src-supplier=Allied+Electronics; ComponentLink2URL: https://datasheet.ciiva.com/5546/dcrcwe3-109170-5546729.pdf?src-supplier=Mouser; ComponentLink2Description: https://datasheet.ciiva.com/5546/dcrcwe3-109170-5546729.pdf?src-supplier=Mouser; ComponentLink3URL: https://datasheet.ciiva.com/9050/dcrcwe3-9050936.pdf?src-supplier=Avnet; ComponentLink3Description: https://datasheet.ciiva.com/9050/dcrcwe3-9050936.pdf?src-supplier=Avnet; ComponentLink4URL: https://datasheet.ciiva.com/16389/dcrcwe3-16389593.pdf?src-supplier=Future+Electronics; ComponentLink4Description: https://datasheet.ciiva.com/16389/dcrcwe3-16389593.pdf?src-supplier=Future+Electronics; ComponentLink5URL: https://datasheet.ciiva.com/7800/dcrcwe3-7800542.pdf?src-supplier=Element14; ComponentLink5Description: https://datasheet.ciiva.com/7800/dcrcwe3-7800542.pdf?src-supplier=Element14; ComponentLink6URL: https://datasheet.ciiva.com/9050/dcrcwe3-9050939.pdf?src-supplier=Avnet; ComponentLink6Description: https://datasheet.ciiva.com/9050/dcrcwe3-9050939.pdf?src-supplier=Avnet
footprint Res-1206
pins: 1, 2

## CRCW120610M0JNEA
designator R?, comment 10M
RES SMD 10M OHM 5% 1/4W 1206; Manufacturer: Vishay Dale; Manufacturer Part Number: CRCW120610M0JNEA; Item Type: Resistors; Supplier: Mouser; LCSC Part Number: C3008961; RoHS: Yes; Stock: 11008; Pricing: 1=0.1, 10=0.027, 50=0.027, 100=0.017, 1000=0.013, 10000=0.007 (USD); ComponentLink1URL: https://datasheet.ciiva.com/5548/dcrcwe3-109170-5548118.pdf?src-supplier=Mouser; ComponentLink1Description: https://datasheet.ciiva.com/5548/dcrcwe3-109170-5548118.pdf?src-supplier=Mouser; ComponentLink2URL: https://datasheet.ciiva.com/16785/70201119-16785301.pdf?src-supplier=Allied+Electronics; ComponentLink2Description: https://datasheet.ciiva.com/16785/70201119-16785301.pdf?src-supplier=Allied+Electronics; ComponentLink3URL: https://datasheet.ciiva.com/28571/1747939-28571976.pdf?src-supplier=Element14; ComponentLink3Description: https://datasheet.ciiva.com/28571/1747939-28571976.pdf?src-supplier=Element14; ComponentLink4URL: https://datasheet.ciiva.com/16385/dcrcwe3-16385852.pdf?src-supplier=Future+Electronics; ComponentLink4Description: https://datasheet.ciiva.com/16385/dcrcwe3-16385852.pdf?src-supplier=Future+Electronics; ComponentLink5URL: https://datasheet.ciiva.com/2526/dcrcwe3-2526187.pdf?src-supplier=Digikey; ComponentLink5Description: https://datasheet.ciiva.com/2526/dcrcwe3-2526187.pdf?src-supplier=Digikey; ComponentLink6URL: https://datasheet.ciiva.com/2526/dcrcwe3-2526188.pdf?src-supplier=Digikey; ComponentLink6Description: https://datasheet.ciiva.com/2526/dcrcwe3-2526188.pdf?src-supplier=Digikey; ComponentLink7URL: https://datasheet.ciiva.com/2526/dcrcwe3-2526189.pdf?src-supplier=Digikey; ComponentLink7Description: https://datasheet.ciiva.com/2526/dcrcwe3-2526189.pdf?src-supplier=Digikey; ComponentLink8URL: https://datasheet.ciiva.com/9050/dcrcwe3-9050878.pdf?src-supplier=Avnet; ComponentLink8Description: https://datasheet.ciiva.com/9050/dcrcwe3-9050878.pdf?src-supplier=Avnet
footprint Res-1206
pins: 1, 2

## CRCW120622K0FKEAC
designator R?, comment 22K
RES 22K OHM 1% 1/4W 1206; Manufacturer: Vishay; Manufacturer Part Number: CRCW120622K0FKEAC; Item Type: Resistor; Supplier: Mouser; Supplier Part Number: 71-CRCW120622K0FKEAC; RoHS: Yes; Category: Chip SMD Resistors; Stock: 118020; Pricing: 1=0.1, 10=0.036, 50=0.036, 100=0.016, 1000=0.011, 10000=0.007 (USD); RoHS Compliant: Yes; LCSC Part Number: C1511874
footprint Res-1206
pins: 1, 2

## CRCW120633K2FKEA
designator R?, comment 33.2K
RES SMD 33.2K OHM 1% 1/4W 1206; Manufacturer: Vishay; Manufacturer Part Number: CRCW120633K2FKEA; Item Type: Resistor; Temperature Coefficient: 100ppm/°C; Voltage Rating (DC): 200V; Supplier: Mouser; LCSC Part Number: C2085805; RoHS: Yes; Stock: 8578; Pricing: 1=0.1, 10=0.03, 50=0.03, 100=0.019, 1000=0.015, 10000=0.009 (USD); Case/Package: 340Case; Pins: 2NUMBER; Min Operating Temperature: -55°C; Max Operating Temperature: 155°C; Tolerance: 1%; Packaging: 13Packaging; Height: 600um; Lead Free: 5697LeadFree; ComponentLink1URL: http://www.farnell.com/datasheets/2310790.pdf?src-supplier=Farnell; ComponentLink1Description: http://www.farnell.com/datasheets/2310790.pdf?src-supplier=Farnell; ComponentLink2URL: https://datasheet.octopart.com/CRCW120633K2FKEA.-Vishay-datasheet-78776209.pdf?src-supplier=Newark; ComponentLink2Description: https://datasheet.octopart.com/CRCW120633K2FKEA.-Vishay-datasheet-78776209.pdf?src-supplier=Newark; ComponentLink3URL: https://datasheet.octopart.com/CRCW120633K2FKEA-Vishay-datasheet-83961561.pdf?src-supplier=Element14; ComponentLink3Description: https://datasheet.octopart.com/CRCW120633K2FKEA-Vishay-datasheet-83961561.pdf?src-supplier=Element14; ComponentLink4URL: https://datasheet.octopart.com/CRCW120633K2FKEA-Vishay-datasheet-5306405.pdf?src-supplier=Future+Electronics; ComponentLink4Description: https://datasheet.octopart.com/CRCW120633K2FKEA-Vishay-datasheet-5306405.pdf?src-supplier=Future+Electronics; ComponentLink5URL: http://www.vishay.com/docs/20035/dcrcwe3.pdf?src-supplier=Digikey; ComponentLink5Description: http://www.vishay.com/docs/20035/dcrcwe3.pdf?src-supplier=Digikey; ComponentLink6URL: https://datasheet.octopart.com/CRCW120633K2FKEA-Vishay-datasheet-31669108.pdf?src-supplier=Farnell; ComponentLink6Description: https://datasheet.octopart.com/CRCW120633K2FKEA-Vishay-datasheet-31669108.pdf?src-supplier=Farnell; ComponentLink7URL: https://datasheet.octopart.com/CRCW120633K2FKEA-Vishay-datasheet-11540273.pdf?src-supplier=Arrow+Electronics; ComponentLink7Description: https://datasheet.octopart.com/CRCW120633K2FKEA-Vishay-datasheet-11540273.pdf?src-supplier=Arrow+Electronics
footprint Res-1206
pins: 1, 2

## CRCW201010K5FKEF
designator R?, comment 10.5K
RES SMD 10.5K OHM 1% 3/4W 2010; Manufacturer: Vishay Dale; Manufacturer Part Number: CRCW201010K5FKEF; Item Type: Resistors; Voltage Rating (DC): 400V; Supplier: Mouser; LCSC Part Number: C3009756; RoHS: Yes; Stock: 2385; Pricing: 1=0.22, 10=0.103, 50=0.103, 100=0.067, 1000=0.049, 10000=0.028 (USD); Lead Free: 5697LeadFree; ComponentLink1URL: https://datasheet.ciiva.com/48526/dcrcwe3-48526619.pdf?src-supplier=Avnet; ComponentLink1Description: https://datasheet.ciiva.com/48526/dcrcwe3-48526619.pdf?src-supplier=Avnet; ComponentLink2URL: https://datasheet.ciiva.com/2476/dcrcwe3-2476773.pdf?src-supplier=Digikey; ComponentLink2Description: https://datasheet.ciiva.com/2476/dcrcwe3-2476773.pdf?src-supplier=Digikey; ComponentLink3URL: https://datasheet.ciiva.com/2476/dcrcwe3-2476774.pdf?src-supplier=Digikey; ComponentLink3Description: https://datasheet.ciiva.com/2476/dcrcwe3-2476774.pdf?src-supplier=Digikey; ComponentLink4URL: https://datasheet.ciiva.com/2476/dcrcwe3-2476775.pdf?src-supplier=Digikey; ComponentLink4Description: https://datasheet.ciiva.com/2476/dcrcwe3-2476775.pdf?src-supplier=Digikey
footprint RES-2010
pins: 1, 2

## CRCW251210K0FKEGHP
designator R?, comment 10K
RES SMD 10K OHM 1% 1.5W 2512; Manufacturer: Vishay Dale; Manufacturer Part Number: CRCW251210K0FKEGHP; Item Type: Resistors; Value: 10kR; Voltage Rating: 500V; Temperature Coefficient: 100ppm/°C; Supplier: Mouser; LCSC Part Number: C2075694; RoHS: Yes; Stock: 1890; Pricing: 1=0.53, 10=0.441, 50=0.441, 100=0.382, 1000=0.257, 10000=0.189 (USD); Case/Package: 2512; Weight: 0.001482oz; Case Code (Imperial): 2512; Case Code (Metric): 6432; Contact Plating: Tin; Min Operating Temperature: -55°C; Max Operating Temperature: 155°C; Tolerance: 1%; Power Rating: 1.5W; Packaging: Tape and Reel; Package Quantity: 2000; Features: Automotive AEC-Q200; Series: CRCW-HP; Max Power Dissipation: 1.5W; Number of Terminations: 2; Length: 6.3mm; Width: 3.2mm; Height: 0.6mm; Ratings: AEC-Q200; Radiation Hardening: No; Lead Free: Lead Free; RoHS Compliant: Yes; ComponentLink1URL: https://datasheet.ciiva.com/5549/crcwhpe3-46056-5549613.pdf?src-supplier=Mouser; ComponentLink1Description: https://datasheet.ciiva.com/5549/crcwhpe3-46056-5549613.pdf?src-supplier=Mouser; ComponentLink2URL: https://datasheet.ciiva.com/9051/crcwhpe3-9051373.pdf?src-supplier=Avnet; ComponentLink2Description: https://datasheet.ciiva.com/9051/crcwhpe3-9051373.pdf?src-supplier=Avnet
footprint RES-2512
pins: 1, 2

## CRCW251216R2FKEG
designator R?, comment 16.2R
RES SMD 16.2 OHM 1% 1W 2512; Manufacturer: Vishay Dale; Manufacturer Part Number: CRCW251216R2FKEG; Item Type: Resistor; Voltage Rating (DC): 500V; Supplier: Mouser; Supplier Part Number: 71-CRCW251216R2FKEG; RoHS: Yes; Stock: 6301; Pricing: 1=0.28, 10=0.122, 50=0.122, 100=0.077, 1000=0.068, 10000=0.044 (USD); Pins: 2NUMBER; Lead Free: 5697LeadFree; ComponentLink1URL: https://datasheet.ciiva.com/16435/dcrcwe3-16435705.pdf?src-supplier=Future+Electronics; ComponentLink1Description: https://datasheet.ciiva.com/16435/dcrcwe3-16435705.pdf?src-supplier=Future+Electronics; ComponentLink2URL: https://datasheet.ciiva.com/5547/dcrcwe3-109170-5547624.pdf?src-supplier=Mouser; ComponentLink2Description: https://datasheet.ciiva.com/5547/dcrcwe3-109170-5547624.pdf?src-supplier=Mouser; ComponentLink3URL: https://datasheet.ciiva.com/9037/dcrcwe3-9037223.pdf?src-supplier=Avnet; ComponentLink3Description: https://datasheet.ciiva.com/9037/dcrcwe3-9037223.pdf?src-supplier=Avnet; ComponentLink4URL: https://datasheet.ciiva.com/7695/dcrcwe3-7695070.pdf?src-supplier=Element14; ComponentLink4Description: https://datasheet.ciiva.com/7695/dcrcwe3-7695070.pdf?src-supplier=Element14
footprint RES-2512
pins: 1, 2

## CRCW251247K0JNEG
designator R?, comment 47K
RES SMD 47K OHM 5% 1W 2512; Manufacturer: Vishay Dale; Manufacturer Part Number: CRCW251247K0JNEG; Item Type: Resistors; Supplier: Mouser; LCSC Part Number: C4032371; RoHS: Yes; Stock: 6078; Pricing: 1=0.27, 10=0.097, 50=0.097, 100=0.066, 1000=0.058, 10000=0.04 (USD); ComponentLink1URL: https://datasheet.ciiva.com/26820/getdatasheetpartid-45653-26820998.pdf?src-supplier=Verical; ComponentLink1Description: https://datasheet.ciiva.com/26820/getdatasheetpartid-45653-26820998.pdf?src-supplier=Verical; ComponentLink2URL: https://datasheet.ciiva.com/2478/dcrcwe3-2478425.pdf?src-supplier=Digikey; ComponentLink2Description: https://datasheet.ciiva.com/2478/dcrcwe3-2478425.pdf?src-supplier=Digikey; ComponentLink3URL: https://datasheet.ciiva.com/2478/dcrcwe3-2478426.pdf?src-supplier=Digikey; ComponentLink3Description: https://datasheet.ciiva.com/2478/dcrcwe3-2478426.pdf?src-supplier=Digikey; ComponentLink4URL: https://datasheet.ciiva.com/2478/dcrcwe3-2478427.pdf?src-supplier=Digikey; ComponentLink4Description: https://datasheet.ciiva.com/2478/dcrcwe3-2478427.pdf?src-supplier=Digikey; ComponentLink5URL: https://datasheet.ciiva.com/9006/dcrcwe3-9006445.pdf?src-supplier=Avnet; ComponentLink5Description: https://datasheet.ciiva.com/9006/dcrcwe3-9006445.pdf?src-supplier=Avnet; ComponentLink6URL: https://datasheet.ciiva.com/46391/1829655-46391638.pdf?src-supplier=Element14; ComponentLink6Description: https://datasheet.ciiva.com/46391/1829655-46391638.pdf?src-supplier=Element14; ComponentLink7URL: https://datasheet.ciiva.com/5546/dcrcwe3-109170-5546327.pdf?src-supplier=Mouser; ComponentLink7Description: https://datasheet.ciiva.com/5546/dcrcwe3-109170-5546327.pdf?src-supplier=Mouser
footprint RES-2512
pins: 1, 2

## CRCW0402330KFKEDC
designator R?, comment 330K
RES 330K OHM 1% 1/16W 0402; Manufacturer: Vishay; Manufacturer Part Number: CRCW0402330KFKEDC; Power Rating: 63mW; Value: 330kR; Item Type: Resistor; Supplier: Mouser; Supplier Part Number: 71-CRCW0402330KFKEDC; RoHS: Yes; Category: Chip SMD Resistors; Stock: 34154; Pricing: 1=0.1, 10=0.017, 50=0.017, 100=0.008, 1000=0.005, 10000=0.004 (USD); Case/Package: 0402; Tolerance: 1%; Lead Free: Lead Free; RoHS Compliant: Yes; LCSC Part Number: C3009051
footprint Res-0402
pins: 1, 2

## CRCW0402330RFKEDC
designator R?, comment 330R
SMD Chip Resistor, 330 Ohm, ± 1%, 63 mW, 0402 [1005 Metric], Thick Film, General Purpose; Manufacturer: Vishay Semiconductors; Manufacturer Part Number: CRCW0402330RFKEDC; Temperature Coefficient: 100ppm/°C; Max Power Dissipation: 63mW; Supplier: Digikey; Supplier Part Number: 541-3996-1-ND; RoHS: Yes; Category: Chip SMD Resistors; Stock: 59136; Pricing: 1=0.1, 10=0.024, 50=0.0152, 100=0.0127, 500=0.00866, 1000=0.00746, 5000=0.00542 (USD); Case/Package: 0402; Case Code (Imperial): 0402; Case Code (Metric): 1005; Min Operating Temperature: -55°C; Max Operating Temperature: 155°C; Tolerance: 1%; Value: 330R; Series: CRCW-C; Packaging: Tape and Reel; Number of Terminations: 2; Lead Free: Lead Free; RoHS Compliant: Yes; ComponentLink1URL: http://www.vishay.com/docs/28773/crcwce3.pdf?src-supplier=Digikey; ComponentLink1Description: http://www.vishay.com/docs/28773/crcwce3.pdf?src-supplier=Digikey
footprint Res-0402
pins: 1, 2